# Altium schematic symbol library 503480-0600.SchLib: 1 symbol
Pins are listed as number, name and electrical type; pins without a type are passive.

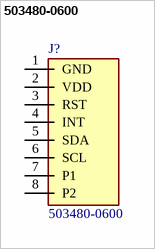
[diagram p0: symbol 503480-0600]

## 503480-0600
designator J?
6 Position FFC, FPC Connector Contacts, Top and Bottom 0.020" (0.50mm) Surface Mount, Right Angle ,  UL 94 V-0  , 50 V  , 500 mA  , - 40 C + 85 C; Manufacturer_Name: Molex; Geometry.Height: 2.07mm; Manufacturer_Part_Number: 503480-0600; Mouser Part Number: 538-503480-0600; Mouser Price/Stock: https://www.mouser.co.uk/ProductDetail/Molex/503480-0600?qs=bodV9ulq6Gw510ukaFX%252Bew%3D%3D; Arrow Part Number: *; Arrow Price/Stock: *; Datasheet Link: https://www.molex.com/content/dam/molex/molex-dot-com/products/automated/en-us/salesdrawingpdf/503/503480/5034800600_sd.pdf
footprint 5034800600
pins: 1 GND, 2 VDD, 3 RST, 4 INT, 5 SDA, 6 SCL, 7 P1, 8 P2